# EAGLE library part HDR-1X15 (library connectors)
Pin header 1 x 15
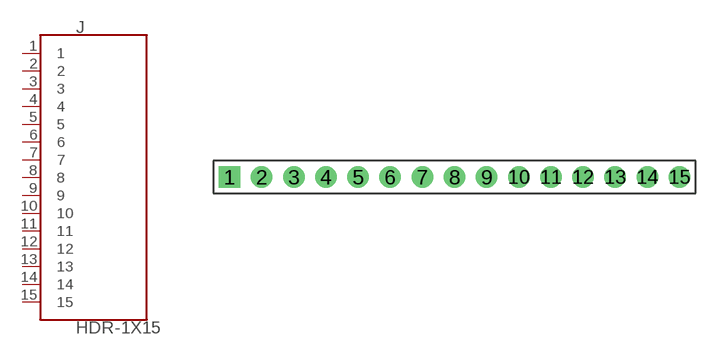
[diagram p2: symbol with the pads of HDR-1X15; footprint HDR-1X15]

Designator prefix J

## HDR-1X15  [HDR-1X15]
1  1  pas
2  2  pas
3  3  pas
4  4  pas
5  5  pas
6  6  pas
7  7  pas
8  8  pas
9  9  pas
10  10  pas
11  11  pas
12  12  pas
13  13  pas
14  14  pas
15  15  pas

## Footprint HDR-1X15 (pad centres in mm)
Pin header, 1 row of 15, pitch 2.54 mm. Sizes: 0.1 inch (2.54 mm) pin strip grid; pads worked out for this kit. Not verified against a datasheet.
drill 1 pad 1.7 square: 1 -17.78,0
drill 1 pad 1.7: 2 -15.24,0; 3 -12.7,0; 4 -10.16,0; 5 -7.62,0; 6 -5.08,0; 7 -2.54,0; 8 0,0; 9 2.54,0; 10 5.08,0; 11 7.62,0; 12 10.16,0; 13 12.7,0; 14 15.24,0; 15 17.78,0